# Altium schematic symbol library 6.98 kΩ 0603.SchLib: 1 symbol
Pins are listed as number, name and electrical type; pins without a type are passive.

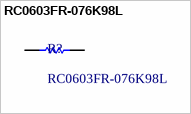
[diagram p0: symbol RC0603FR-076K98L]

## RC0603FR-076K98L
designator R?
6.98 kΩ 0603; Supplier 1: Avnet; Supplier Part Number 1: RC0603FR-076K98L; LCSC Part #: C137686
footprint R_0603_1608Metric (Chip Resistor, 2-Leads, Body 1.60x0.80mm, IPC Medium Density)
pins: 1, 2